# Altium footprint library 2mmHole.PcbLib: 1 footprints
Each footprint in its own frame and in the unit in brackets; x right, y up, seen from the top. Pads: shape width x height; smd on the part's side, far side on the other; paste and mask are expansions set on the pad; w line width, h text height; cw(c..) or ccw(c..) is an arc to the next point about the centre after c.
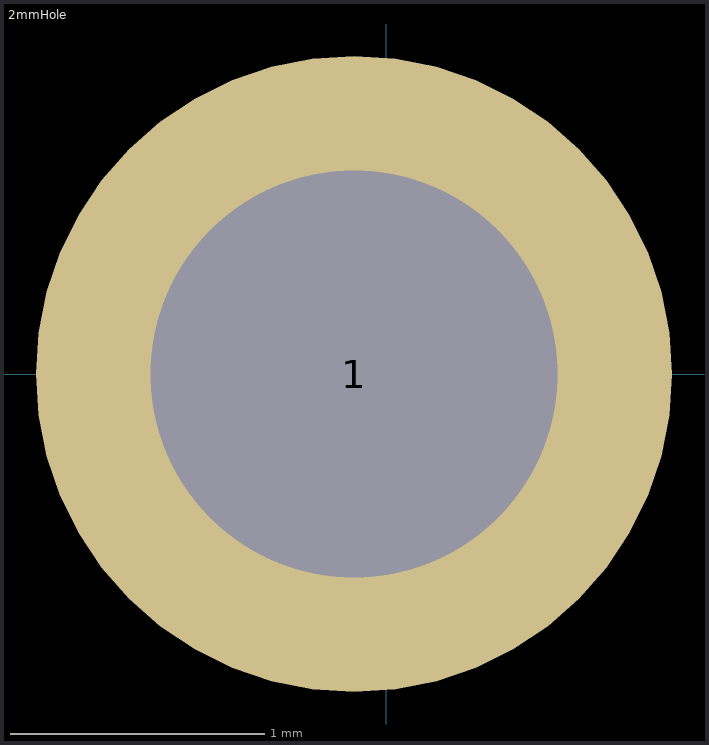
[diagram p0: the footprint, top view; thin cyan lines are the x and y axes]

## 2mmHole [mm]
pads (1):
  round 2.5 / inner round 1.524 / far side round 2.5 hole 1.6 paste-2539.97: 1(-0.127,0)